# Altium footprint library TYPE-C-31-M-12.PcbLib: 1 footprints
Each footprint in its own frame and in the unit in brackets; x right, y up, seen from the top. Pads: shape width x height; smd on the part's side, far side on the other; paste and mask are expansions set on the pad; w line width, h text height; cw(c..) or ccw(c..) is an arc to the next point about the centre after c.
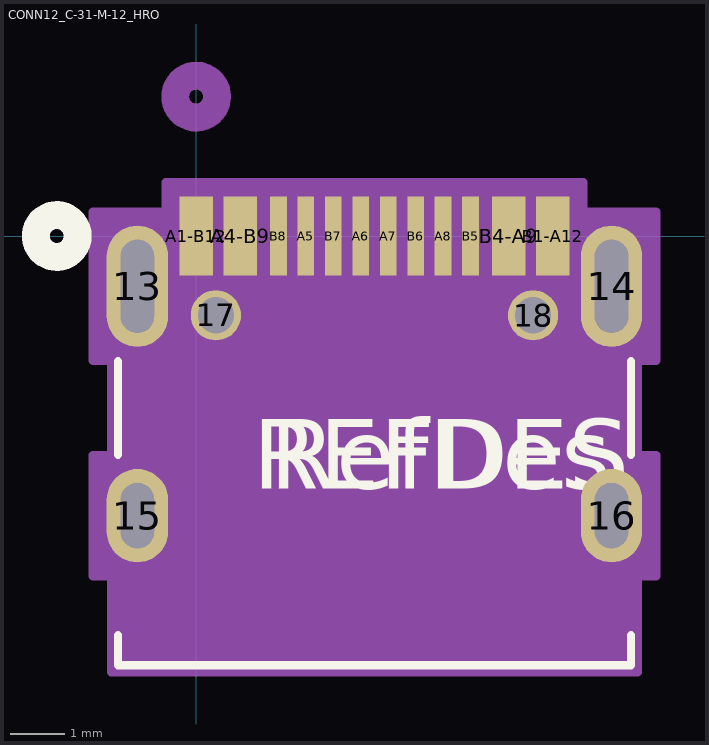
[diagram p0: the footprint, top view; thin cyan lines are the x and y axes]

## CONN12_C-31-M-12_HRO [mil]
pads (18):
  oval 44x87 / inner round 60 / far side oval 44x87 hole 24 slot 67 at 90 deg paste-99999 mask+0: 13(-42.12,-36.06) 14(298.04,-36.06)
  oval 44x67 / inner round 60 / far side oval 44x67 hole 24 slot 47 at 90 deg paste-99999 mask+0: 15(-42.12,-200.63) 16(298.04,-200.63)
  round 36 / inner round 60 / far side round 36 hole 26 paste-99999 mask-18: 17(14.18,-56.93) 18(241.74,-56.93)
  rect 24x57 smd paste-28.5 mask-28.5: A1-B12(0,0) A4-B9(31.51,0) B1-A12(255.92,0) B4-A9(224.41,0)
  rect 12x57 smd paste-28.5 mask-28.5: A5(78.75,0) A6(118.12,0) A7(137.81,0) A8(177.18,0) B5(196.87,0) B6(157.5,0) B7(98.43,0) B8(59.06,0)
Top Overlay:
  circle w20: c-100,0 r15
  lines w6: -56.04,-286.53 -56.04,-308 311.96,-308 311.96,-286.53 ; -56.04,-156.91 -56.04,-89.78 ; 311.96,-156.91 311.96,-89.78
  text "REFDES" at 40.46,-181.5 h50
  text "RefDes" at 52.96,-181.5 h50
Bottom Overlay:
  circle w20: c-100,0 r15
Mechanical 13:
  circle w20: c0,100 r15
  lines w1: -51.04,-303 -51.04,-10 306.96,-10 306.96,-303 -51.04,-303
  text "RefDes2" at 40.46,-181.5 h50
Mechanical 15:
  region: 316.96,-89.56 330.04,-89.56 330.04,17.44 277.92,17.44 277.92,38.5 -22,38.5 -22,17.44 -74.12,17.44 -74.12,-89.56 -61.04,-89.56 -61.04,-157.13 -74.12,-157.13 -74.12,-244.13 -61.04,-244.13 -61.04,-313 316.96,-313 316.96,-244.13 330.04,-244.13 330.04,-157.13 316.96,-157.13
  lines w6: -74.12,-244.13 -61.04,-244.13 -61.04,-313 316.96,-313 316.96,-244.13 330.04,-244.13 330.04,-157.13 316.96,-157.13 316.96,-89.56 330.04,-89.56 330.04,17.44 277.92,17.44 277.92,38.5 -22,38.5 -22,17.44 -74.12,17.44 -74.12,-89.56 -61.04,-89.56 -61.04,-157.13 -74.12,-157.13 -74.12,-244.13